# Altium footprint library MicroController$.PcbLib: 36 footprints (part 2 of 3)
Each footprint in its own frame and in the unit in brackets; x right, y up, seen from the top. Pads: shape width x height; smd on the part's side, far side on the other; paste and mask are expansions set on the pad; w line width, h text height; cw(c..) or ccw(c..) is an arc to the next point about the centre after c.
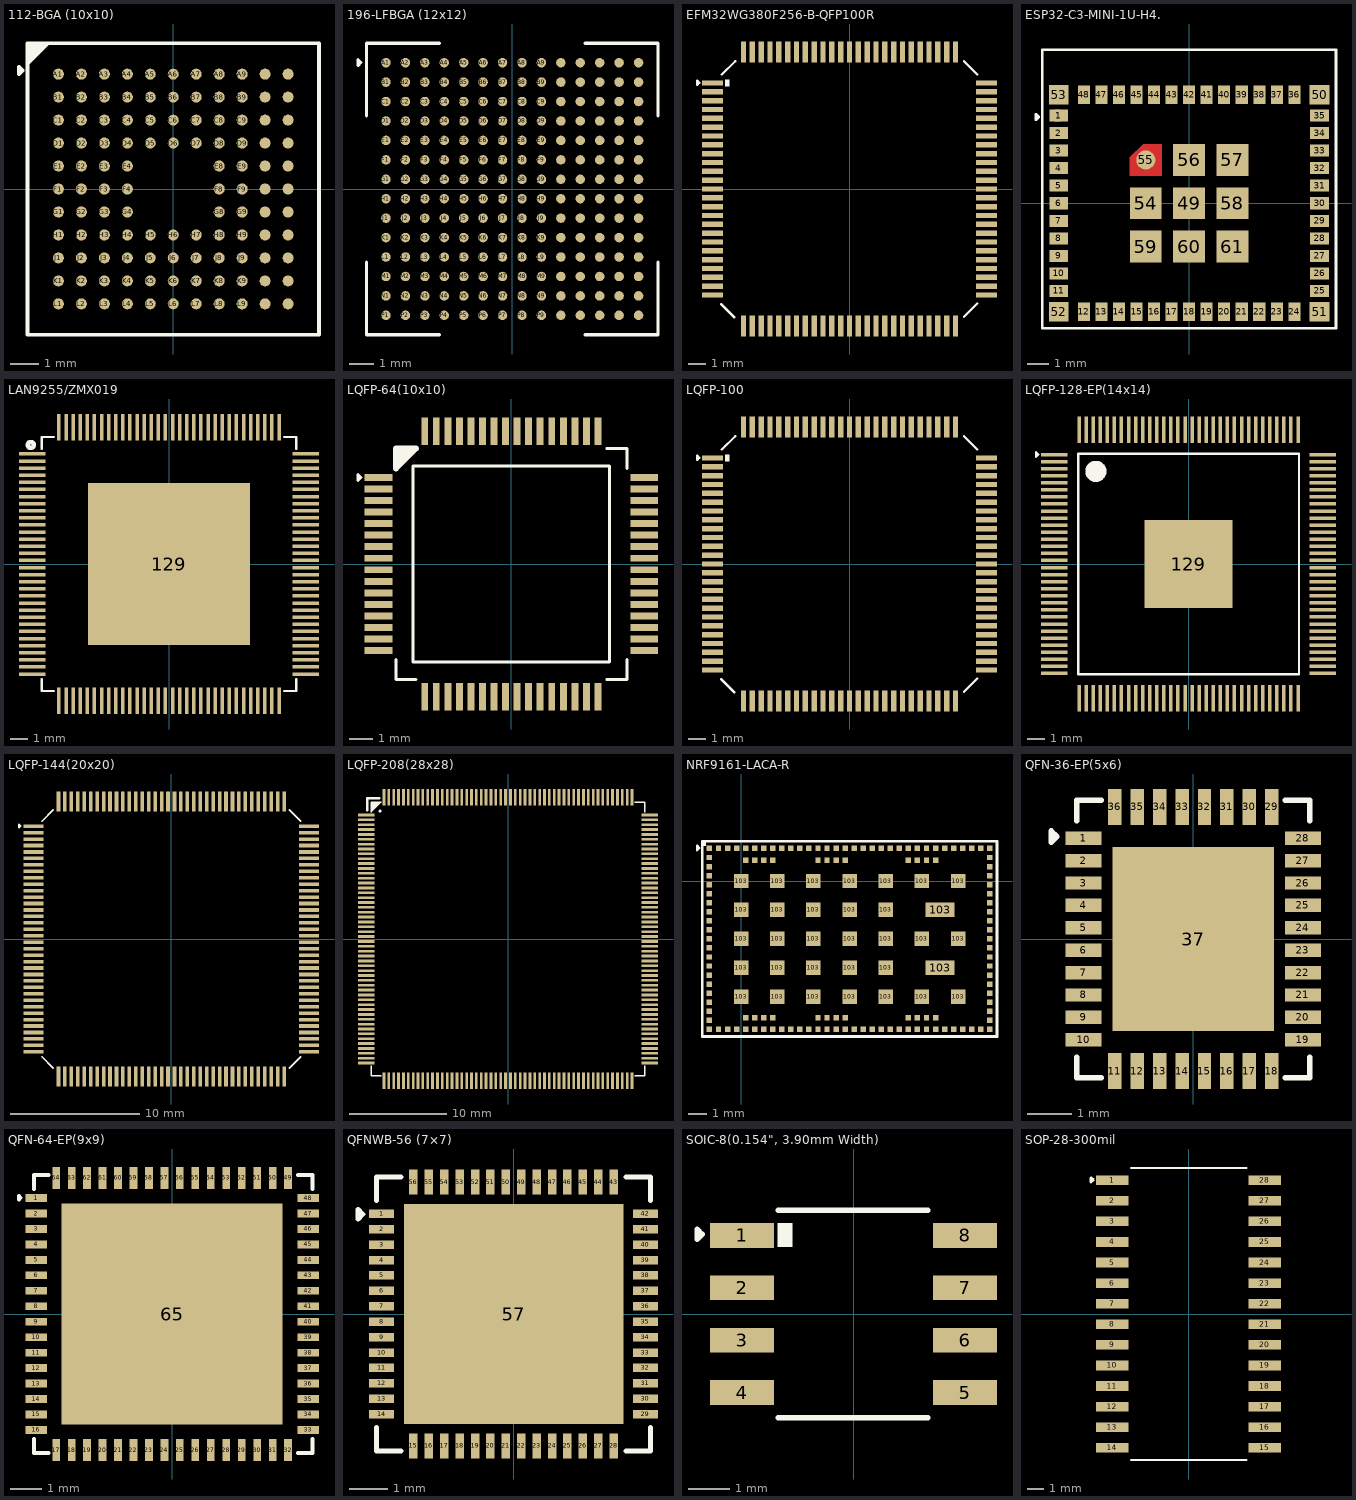
[diagram p1: the footprints below, top view; thin cyan lines are the x and y axes]

## 112-BGA (10x10) [mm]
pads (112):
  round 0.384 smd paste-100 mask+0.051: A1(-4,4) A2(-3.2,4) A3(-2.4,4) A4(-1.6,4) A5(-0.8,4) A6(0,4) A7(0.8,4) A8(1.6,4) A9(2.4,4) A10(3.2,4) A11(4,4) B1(-4,3.2) B2(-3.2,3.2) B3(-2.4,3.2) B4(-1.6,3.2) B5(-0.8,3.2) B6(0,3.2) B7(0.8,3.2) B8(1.6,3.2) B9(2.4,3.2) B10(3.2,3.2) B11(4,3.2) C1(-4,2.4) C2(-3.2,2.4) C3(-2.4,2.4) C4(-1.6,2.4) C5(-0.8,2.4) C6(0,2.4) C7(0.8,2.4) C8(1.6,2.4) C9(2.4,2.4) C10(3.2,2.4) C11(4,2.4) D1(-4,1.6) D2(-3.2,1.6) D3(-2.4,1.6) D4(-1.6,1.6) D5(-0.8,1.6) D6(0,1.6) D7(0.8,1.6) D8(1.6,1.6) D9(2.4,1.6) D10(3.2,1.6) D11(4,1.6) E1(-4,0.8) E2(-3.2,0.8) E3(-2.4,0.8) E4(-1.6,0.8) E8(1.6,0.8) E9(2.4,0.8) E10(3.2,0.8) E11(4,0.8) F1(-4,0) F2(-3.2,0) F3(-2.4,0) F4(-1.6,0) F8(1.6,0) F9(2.4,0) F10(3.2,0) F11(4,0) G1(-4,-0.8) G2(-3.2,-0.8) G3(-2.4,-0.8) G4(-1.6,-0.8) G8(1.6,-0.8) G9(2.4,-0.8) G10(3.2,-0.8) G11(4,-0.8) H1(-4,-1.6) H2(-3.2,-1.6) H3(-2.4,-1.6) H4(-1.6,-1.6) H5(-0.8,-1.6) H6(0,-1.6) H7(0.8,-1.6) H8(1.6,-1.6) H9(2.4,-1.6) H10(3.2,-1.6) H11(4,-1.6) J1(-4,-2.4) J2(-3.2,-2.4) J3(-2.4,-2.4) J4(-1.6,-2.4) J5(-0.8,-2.4) J6(0,-2.4) J7(0.8,-2.4) J8(1.6,-2.4) J9(2.4,-2.4) J10(3.2,-2.4) J11(4,-2.4) K1(-4,-3.2) K2(-3.2,-3.2) K3(-2.4,-3.2) K4(-1.6,-3.2) K5(-0.8,-3.2) K6(0,-3.2) K7(0.8,-3.2) K8(1.6,-3.2) K9(2.4,-3.2) K10(3.2,-3.2) K11(4,-3.2) L1(-4,-4) L2(-3.2,-4) L3(-2.4,-4) L4(-1.6,-4) L5(-0.8,-4) L6(0,-4) L7(0.8,-4) L8(1.6,-4) L9(2.4,-4) L10(3.2,-4) L11(4,-4)
Top Overlay:
  region: -5.076,5.076 -4.276,5.076 -5.076,4.276
  lines w0.127: -5.372,4 -5.372,4.254 -5.245,4.127 -5.372,4 ; -5.076,-5.076 5.076,-5.076 5.076,5.076 -5.076,5.076 -5.076,-5.076
Top Paste:
  circle w0.192: c4,-4 r0.096
  circle w0.192: c4,-3.2 r0.096
  circle w0.192: c4,-2.4 r0.096
  circle w0.192: c4,-1.6 r0.096
  circle w0.192: c4,-0.8 r0.096
  circle w0.192: c4,0 r0.096
  circle w0.192: c4,0.8 r0.096
  circle w0.192: c4,1.6 r0.096
  circle w0.192: c4,2.4 r0.096
  circle w0.192: c4,3.2 r0.096
  circle w0.192: c4,4 r0.096
  circle w0.192: c3.2,-4 r0.096
  circle w0.192: c3.2,-3.2 r0.096
  circle w0.192: c3.2,-2.4 r0.096
  circle w0.192: c3.2,-1.6 r0.096
  circle w0.192: c3.2,-0.8 r0.096
  circle w0.192: c3.2,0 r0.096
  circle w0.192: c3.2,0.8 r0.096
  circle w0.192: c3.2,1.6 r0.096
  circle w0.192: c3.2,2.4 r0.096
  circle w0.192: c3.2,3.2 r0.096
  circle w0.192: c3.2,4 r0.096
  circle w0.192: c2.4,-4 r0.096
  circle w0.192: c2.4,-3.2 r0.096
  circle w0.192: c2.4,-2.4 r0.096
  circle w0.192: c2.4,-1.6 r0.096
  circle w0.192: c2.4,-0.8 r0.096
  circle w0.192: c2.4,0 r0.096
  circle w0.192: c2.4,0.8 r0.096
  circle w0.192: c2.4,1.6 r0.096
  circle w0.192: c2.4,2.4 r0.096
  circle w0.192: c2.4,3.2 r0.096
  circle w0.192: c2.4,4 r0.096
  circle w0.192: c1.6,-4 r0.096
  circle w0.192: c1.6,-3.2 r0.096
  circle w0.192: c1.6,-2.4 r0.096
  circle w0.192: c1.6,-1.6 r0.096
  circle w0.192: c1.6,-0.8 r0.096
  circle w0.192: c1.6,0 r0.096
  circle w0.192: c1.6,0.8 r0.096
  circle w0.192: c1.6,1.6 r0.096
  circle w0.192: c1.6,2.4 r0.096
  circle w0.192: c1.6,3.2 r0.096
  circle w0.192: c1.6,4 r0.096
  circle w0.192: c0.8,-4 r0.096
  circle w0.192: c0.8,-3.2 r0.096
  circle w0.192: c0.8,-2.4 r0.096
  circle w0.192: c0.8,-1.6 r0.096
  circle w0.192: c0.8,1.6 r0.096
  circle w0.192: c0.8,2.4 r0.096
  circle w0.192: c0.8,3.2 r0.096
  circle w0.192: c0.8,4 r0.096
  circle w0.192: c0,-4 r0.096
  circle w0.192: c0,-3.2 r0.096
  circle w0.192: c0,-2.4 r0.096
  circle w0.192: c0,-1.6 r0.096
  circle w0.192: c0,1.6 r0.096
  circle w0.192: c0,2.4 r0.096
  circle w0.192: c0,3.2 r0.096
  circle w0.192: c0,4 r0.096
  circle w0.192: c-0.8,-4 r0.096
  circle w0.192: c-0.8,-3.2 r0.096
  circle w0.192: c-0.8,-2.4 r0.096
  circle w0.192: c-0.8,-1.6 r0.096
  circle w0.192: c-0.8,1.6 r0.096
  circle w0.192: c-0.8,2.4 r0.096
  circle w0.192: c-0.8,3.2 r0.096
  circle w0.192: c-0.8,4 r0.096
  circle w0.192: c-1.6,-4 r0.096
  circle w0.192: c-1.6,-3.2 r0.096
  circle w0.192: c-1.6,-2.4 r0.096
  circle w0.192: c-1.6,-1.6 r0.096
  circle w0.192: c-1.6,-0.8 r0.096
  circle w0.192: c-1.6,0 r0.096
  circle w0.192: c-1.6,0.8 r0.096
  circle w0.192: c-1.6,1.6 r0.096
  circle w0.192: c-1.6,2.4 r0.096
  circle w0.192: c-1.6,3.2 r0.096
  circle w0.192: c-1.6,4 r0.096
  circle w0.192: c-2.4,-4 r0.096
  circle w0.192: c-2.4,-3.2 r0.096
  circle w0.192: c-2.4,-2.4 r0.096
  circle w0.192: c-2.4,-1.6 r0.096
  circle w0.192: c-2.4,-0.8 r0.096
  circle w0.192: c-2.4,0 r0.096
  circle w0.192: c-2.4,0.8 r0.096
  circle w0.192: c-2.4,1.6 r0.096
  circle w0.192: c-2.4,2.4 r0.096
  circle w0.192: c-2.4,3.2 r0.096
  circle w0.192: c-2.4,4 r0.096
  circle w0.192: c-3.2,-4 r0.096
  circle w0.192: c-3.2,-3.2 r0.096
  circle w0.192: c-3.2,-2.4 r0.096
  circle w0.192: c-3.2,-1.6 r0.096
  circle w0.192: c-3.2,-0.8 r0.096
  circle w0.192: c-3.2,0 r0.096
  circle w0.192: c-3.2,0.8 r0.096
  circle w0.192: c-3.2,1.6 r0.096
  circle w0.192: c-3.2,2.4 r0.096
  circle w0.192: c-3.2,3.2 r0.096
  circle w0.192: c-3.2,4 r0.096
  circle w0.192: c-4,-4 r0.096
  circle w0.192: c-4,-3.2 r0.096
  circle w0.192: c-4,-2.4 r0.096
  circle w0.192: c-4,-1.6 r0.096
  circle w0.192: c-4,-0.8 r0.096
  circle w0.192: c-4,0 r0.096
  circle w0.192: c-4,0.8 r0.096
  circle w0.192: c-4,1.6 r0.096
  circle w0.192: c-4,2.4 r0.096
  circle w0.192: c-4,3.2 r0.096
  circle w0.192: c-4,4 r0.096
3D body "C3210780.step": height 1.17, standoff 0, extent -5,-5 5,5

## 196-LFBGA (12x12) [mm]
pads (196):
  round 0.39 smd: A1(-5.2,5.2) A2(-4.4,5.2) A3(-3.6,5.2) A4(-2.8,5.2) A5(-2,5.2) A6(-1.2,5.2) A7(-0.4,5.2) A8(0.4,5.2) A9(1.2,5.2) A10(2,5.2) A11(2.8,5.2) A12(3.6,5.2) A13(4.4,5.2) A14(5.2,5.2) B1(-5.2,4.4) B2(-4.4,4.4) B3(-3.6,4.4) B4(-2.8,4.4) B5(-2,4.4) B6(-1.2,4.4) B7(-0.4,4.4) B8(0.4,4.4) B9(1.2,4.4) B10(2,4.4) B11(2.8,4.4) B12(3.6,4.4) B13(4.4,4.4) B14(5.2,4.4) C1(-5.2,3.6) C2(-4.4,3.6) C3(-3.6,3.6) C4(-2.8,3.6) C5(-2,3.6) C6(-1.2,3.6) C7(-0.4,3.6) C8(0.4,3.6) C9(1.2,3.6) C10(2,3.6) C11(2.8,3.6) C12(3.6,3.6) C13(4.4,3.6) C14(5.2,3.6) D1(-5.2,2.8) D2(-4.4,2.8) D3(-3.6,2.8) D4(-2.8,2.8) D5(-2,2.8) D6(-1.2,2.8) D7(-0.4,2.8) D8(0.4,2.8) D9(1.2,2.8) D10(2,2.8) D11(2.8,2.8) D12(3.6,2.8) D13(4.4,2.8) D14(5.2,2.8) E1(-5.2,2) E2(-4.4,2) E3(-3.6,2) E4(-2.8,2) E5(-2,2) E6(-1.2,2) E7(-0.4,2) E8(0.4,2) E9(1.2,2) E10(2,2) E11(2.8,2) E12(3.6,2) E13(4.4,2) E14(5.2,2) F1(-5.2,1.2) F2(-4.4,1.2) F3(-3.6,1.2) F4(-2.8,1.2) F5(-2,1.2) F6(-1.2,1.2) F7(-0.4,1.2) F8(0.4,1.2) F9(1.2,1.2) F10(2,1.2) F11(2.8,1.2) F12(3.6,1.2) F13(4.4,1.2) F14(5.2,1.2) G1(-5.2,0.4) G2(-4.4,0.4) G3(-3.6,0.4) G4(-2.8,0.4) G5(-2,0.4) G6(-1.2,0.4) G7(-0.4,0.4) G8(0.4,0.4) G9(1.2,0.4) G10(2,0.4) G11(2.8,0.4) G12(3.6,0.4) G13(4.4,0.4) G14(5.2,0.4) H1(-5.2,-0.4) H2(-4.4,-0.4) H3(-3.6,-0.4) H4(-2.8,-0.4) H5(-2,-0.4) H6(-1.2,-0.4) H7(-0.4,-0.4) H8(0.4,-0.4) H9(1.2,-0.4) H10(2,-0.4) H11(2.8,-0.4) H12(3.6,-0.4) H13(4.4,-0.4) H14(5.2,-0.4) J1(-5.2,-1.2) J2(-4.4,-1.2) J3(-3.6,-1.2) J4(-2.8,-1.2) J5(-2,-1.2) J6(-1.2,-1.2) J7(-0.4,-1.2) J8(0.4,-1.2) J9(1.2,-1.2) J10(2,-1.2) J11(2.8,-1.2) J12(3.6,-1.2) J13(4.4,-1.2) J14(5.2,-1.2) K1(-5.2,-2) K2(-4.4,-2) K3(-3.6,-2) K4(-2.8,-2) K5(-2,-2) K6(-1.2,-2) K7(-0.4,-2) K8(0.4,-2) K9(1.2,-2) K10(2,-2) K11(2.8,-2) K12(3.6,-2) K13(4.4,-2) K14(5.2,-2) L1(-5.2,-2.8) L2(-4.4,-2.8) L3(-3.6,-2.8) L4(-2.8,-2.8) L5(-2,-2.8) L6(-1.2,-2.8) L7(-0.4,-2.8) L8(0.4,-2.8) L9(1.2,-2.8) L10(2,-2.8) L11(2.8,-2.8) L12(3.6,-2.8) L13(4.4,-2.8) L14(5.2,-2.8) M1(-5.2,-3.6) M2(-4.4,-3.6) M3(-3.6,-3.6) M4(-2.8,-3.6) M5(-2,-3.6) M6(-1.2,-3.6) M7(-0.4,-3.6) M8(0.4,-3.6) M9(1.2,-3.6) M10(2,-3.6) M11(2.8,-3.6) M12(3.6,-3.6) M13(4.4,-3.6) M14(5.2,-3.6) N1(-5.2,-4.4) N2(-4.4,-4.4) N3(-3.6,-4.4) N4(-2.8,-4.4) N5(-2,-4.4) N6(-1.2,-4.4) N7(-0.4,-4.4) N8(0.4,-4.4) N9(1.2,-4.4) N10(2,-4.4) N11(2.8,-4.4) N12(3.6,-4.4) N13(4.4,-4.4) N14(5.2,-4.4) P1(-5.2,-5.2) P2(-4.4,-5.2) P3(-3.6,-5.2) P4(-2.8,-5.2) P5(-2,-5.2) P6(-1.2,-5.2) P7(-0.4,-5.2) P8(0.4,-5.2) P9(1.2,-5.2) P10(2,-5.2) P11(2.8,-5.2) P12(3.6,-5.2) P13(4.4,-5.2) P14(5.2,-5.2)
Top Overlay:
  lines w0.127: -6,-3 -6,-6 -3,-6 ; -6,3 -6,6 -3,6 ; 3,-6 6,-6 6,-3 ; 3,6 6,6 6,3 ; -6.35,5.08 -6.35,5.334 -6.223,5.207 -6.35,5.08
3D body "MIMXRT1052CVJ5B--3DModel-STEP-56544.STEP": height 1.58, standoff -0.03, extent -6,-6 6,6

## EFM32WG380F256-B-QFP100R [mm]
pads (100):
  rect 1.2x0.3 smd: 1(-7.75,6) 2(-7.75,5.5) 3(-7.75,5) 4(-7.75,4.5) 5(-7.75,4) 6(-7.75,3.5) 7(-7.75,3) 8(-7.75,2.5) 9(-7.75,2) 10(-7.75,1.5) 11(-7.75,1) 12(-7.75,0.5) 13(-7.75,0) 14(-7.75,-0.5) 15(-7.75,-1) 16(-7.75,-1.5) 17(-7.75,-2) 18(-7.75,-2.5) 19(-7.75,-3) 20(-7.75,-3.5) 21(-7.75,-4) 22(-7.75,-4.5) 23(-7.75,-5) 24(-7.75,-5.5) 25(-7.75,-6) 51(7.75,-6) 52(7.75,-5.5) 53(7.75,-5) 54(7.75,-4.5) 55(7.75,-4) 56(7.75,-3.5) 57(7.75,-3) 58(7.75,-2.5) 59(7.75,-2) 60(7.75,-1.5) 61(7.75,-1) 62(7.75,-0.5) 63(7.75,0) 64(7.75,0.5) 65(7.75,1) 66(7.75,1.5) 67(7.75,2) 68(7.75,2.5) 69(7.75,3) 70(7.75,3.5) 71(7.75,4) 72(7.75,4.5) 73(7.75,5) 74(7.75,5.5) 75(7.75,6)
  rect 0.3x1.2 smd: 26(-6,-7.75) 27(-5.5,-7.75) 28(-5,-7.75) 29(-4.5,-7.75) 30(-4,-7.75) 31(-3.5,-7.75) 32(-3,-7.75) 33(-2.5,-7.75) 34(-2,-7.75) 35(-1.5,-7.75) 36(-1,-7.75) 37(-0.5,-7.75) 38(0,-7.75) 39(0.5,-7.75) 40(1,-7.75) 41(1.5,-7.75) 42(2,-7.75) 43(2.5,-7.75) 44(3,-7.75) 45(3.5,-7.75) 46(4,-7.75) 47(4.5,-7.75) 48(5,-7.75) 49(5.5,-7.75) 50(6,-7.75) 76(6,7.75) 77(5.5,7.75) 78(5,7.75) 79(4.5,7.75) 80(4,7.75) 81(3.5,7.75) 82(3,7.75) 83(2.5,7.75) 84(2,7.75) 85(1.5,7.75) 86(1,7.75) 87(0.5,7.75) 88(0,7.75) 89(-0.5,7.75) 90(-1,7.75) 91(-1.5,7.75) 92(-2,7.75) 93(-2.5,7.75) 94(-3,7.75) 95(-3.5,7.75) 96(-4,7.75) 97(-4.5,7.75) 98(-5,7.75) 99(-5.5,7.75) 100(-6,7.75)
Top Overlay:
  rectangle: -7.061,5.791 -6.782,6.198
  lines w0.127: -7.273,-6.511 -6.511,-7.273 ; -7.239,6.477 -6.477,7.239 ; 6.477,-7.239 7.239,-6.477 ; 6.477,7.239 7.239,6.477 ; -8.636,5.893 -8.636,6.147 -8.509,6.02 -8.636,5.893
3D body "User Library-LQFP100_05.step": height 1.6, standoff 0, extent -8,-8 8,8

## ESP32-C3-MINI-1U-H4. [mm]
pads (61):
  rect 0.85x0.55 smd paste+0 mask+0.05: 1(-5.95,4) 2(-5.95,3.2) 3(-5.95,2.4) 4(-5.95,1.6) 5(-5.95,0.8) 6(-5.95,0) 7(-5.95,-0.8) 8(-5.95,-1.6) 9(-5.95,-2.4) 10(-5.95,-3.2) 11(-5.95,-4) 25(5.95,-4) 26(5.95,-3.2) 27(5.95,-2.4) 28(5.95,-1.6) 29(5.95,-0.8) 30(5.95,0) 31(5.95,0.8) 32(5.95,1.6) 33(5.95,2.4) 34(5.95,3.2) 35(5.95,4)
  rect 0.55x0.85 smd paste+0 mask+0.05: 12(-4.8,-4.95) 13(-4,-4.95) 14(-3.2,-4.95) 15(-2.4,-4.95) 16(-1.6,-4.95) 17(-0.8,-4.95) 18(0,-4.95) 19(0.8,-4.95) 20(1.6,-4.95) 21(2.4,-4.95) 22(3.2,-4.95) 23(4,-4.95) 24(4.8,-4.95) 36(4.8,4.95) 37(4,4.95) 38(3.2,4.95) 39(2.4,4.95) 40(1.6,4.95) 41(0.8,4.95) 42(0,4.95) 43(-0.8,4.95) 44(-1.6,4.95) 45(-2.4,4.95) 46(-3.2,4.95) 47(-4,4.95) 48(-4.8,4.95)
  rect 1.45x1.45 smd paste+0 mask+0.05: 49(0,0) 54(-1.975,0) 56(0,1.975) 57(1.975,1.975) 58(1.975,0) 59(-1.975,-1.975) 60(0,-1.975) 61(1.975,-1.975)
  rect 0.9x0.9 smd paste+0 mask+0.05: 50(5.95,4.95) 51(5.95,-4.95) 52(-5.95,-4.95) 53(-5.95,4.95)
  round 0.87 smd: 55(-1.975,1.975)
Top Layer:
  region: -2.7,2.1 -2.1,2.7 -1.25,2.7 -1.25,1.25 -2.7,1.25
Top Overlay:
  lines w0.127: -6.7,3.45 -6.7,7 6.7,7 6.7,-5.7 -6.7,-5.7 -6.7,3.5 ; -6.985,3.81 -6.985,4.064 -6.858,3.937 -6.985,3.81
Mechanical 6:
  circle w0.3: c-6,4 r0.15
3D body "ESP32-C3-MINI-1U 3D Model.STEP": height 2.4, standoff 0, extent -6.6,-5.588 6.6,6.912

## LAN9255/ZMX019 [mm]
pads (129):
  rect 1.5x0.2 smd: 1(-7.7,6.2) 2(-7.7,5.8) 3(-7.7,5.4) 4(-7.7,5) 5(-7.7,4.6) 6(-7.7,4.2) 7(-7.7,3.8) 8(-7.7,3.4) 9(-7.7,3) 10(-7.7,2.6) 11(-7.7,2.2) 12(-7.7,1.8) 13(-7.7,1.4) 14(-7.7,1) 15(-7.7,0.6) 16(-7.7,0.2) 17(-7.7,-0.2) 18(-7.7,-0.6) 19(-7.7,-1) 20(-7.7,-1.4) 21(-7.7,-1.8) 22(-7.7,-2.2) 23(-7.7,-2.6) 24(-7.7,-3) 25(-7.7,-3.4) 26(-7.7,-3.8) 27(-7.7,-4.2) 28(-7.7,-4.6) 29(-7.7,-5) 30(-7.7,-5.4) 31(-7.7,-5.8) 32(-7.7,-6.2) 65(7.7,-6.2) 66(7.7,-5.8) 67(7.7,-5.4) 68(7.7,-5) 69(7.7,-4.6) 70(7.7,-4.2) 71(7.7,-3.8) 72(7.7,-3.4) 73(7.7,-3) 74(7.7,-2.6) 75(7.7,-2.2) 76(7.7,-1.8) 77(7.7,-1.4) 78(7.7,-1) 79(7.7,-0.6) 80(7.7,-0.2) 81(7.7,0.2) 82(7.7,0.6) 83(7.7,1) 84(7.7,1.4) 85(7.7,1.8) 86(7.7,2.2) 87(7.7,2.6) 88(7.7,3) 89(7.7,3.4) 90(7.7,3.8) 91(7.7,4.2) 92(7.7,4.6) 93(7.7,5) 94(7.7,5.4) 95(7.7,5.8) 96(7.7,6.2)
  rect 0.2x1.5 smd: 33(-6.2,-7.7) 34(-5.8,-7.7) 35(-5.4,-7.7) 36(-5,-7.7) 37(-4.6,-7.7) 38(-4.2,-7.7) 39(-3.8,-7.7) 40(-3.4,-7.7) 41(-3,-7.7) 42(-2.6,-7.7) 43(-2.2,-7.7) 44(-1.8,-7.7) 45(-1.4,-7.7) 46(-1,-7.7) 47(-0.6,-7.7) 48(-0.2,-7.7) 49(0.2,-7.7) 50(0.6,-7.7) 51(1,-7.7) 52(1.4,-7.7) 53(1.8,-7.7) 54(2.2,-7.7) 55(2.6,-7.7) 56(3,-7.7) 57(3.4,-7.7) 58(3.8,-7.7) 59(4.2,-7.7) 60(4.6,-7.7) 61(5,-7.7) 62(5.4,-7.7) 63(5.8,-7.7) 64(6.2,-7.7) 97(6.2,7.7) 98(5.8,7.7) 99(5.4,7.7) 100(5,7.7) 101(4.6,7.7) 102(4.2,7.7) 103(3.8,7.7) 104(3.4,7.7) 105(3,7.7) 106(2.6,7.7) 107(2.2,7.7) 108(1.8,7.7) 109(1.4,7.7) 110(1,7.7) 111(0.6,7.7) 112(0.2,7.7) 113(-0.2,7.7) 114(-0.6,7.7) 115(-1,7.7) 116(-1.4,7.7) 117(-1.8,7.7) 118(-2.2,7.7) 119(-2.6,7.7) 120(-3,7.7) 121(-3.4,7.7) 122(-3.8,7.7) 123(-4.2,7.7) 124(-4.6,7.7) 125(-5,7.7) 126(-5.4,7.7) 127(-5.8,7.7) 128(-6.2,7.7)
  rect 9.1x9.1 smd: 129(0,0)
Top Overlay:
  circle w0.254: c-7.785,6.706 r0.165
  lines w0.127: -7.163,-6.49 -7.163,-7.15 -6.477,-7.15 ; -7.163,6.49 -7.163,7.15 -6.477,7.15 ; 6.477,-7.15 7.163,-7.15 7.163,-6.49 ; 6.477,7.15 7.163,7.15 7.163,6.49
3D body "User Library-TQFP128.step": height 1.1, standoff 0, extent -8.009,-8.009 8.009,8.009

## LQFP-64(10x10) [mm]
pads (64):
  rect 1.2x0.3 smd paste+0 mask+0.051: 1(-5.75,3.75) 2(-5.75,3.25) 3(-5.75,2.75) 4(-5.75,2.25) 5(-5.75,1.75) 6(-5.75,1.25) 7(-5.75,0.75) 8(-5.75,0.25) 9(-5.75,-0.25) 10(-5.75,-0.75) 11(-5.75,-1.25) 12(-5.75,-1.75) 13(-5.75,-2.25) 14(-5.75,-2.75) 15(-5.75,-3.25) 16(-5.75,-3.75) 33(5.75,-3.75) 34(5.75,-3.25) 35(5.75,-2.75) 36(5.75,-2.25) 37(5.75,-1.75) 38(5.75,-1.25) 39(5.75,-0.75) 40(5.75,-0.25) 41(5.75,0.25) 42(5.75,0.75) 43(5.75,1.25) 44(5.75,1.75) 45(5.75,2.25) 46(5.75,2.75) 47(5.75,3.25) 48(5.75,3.75)
  rect 0.3x1.2 smd paste+0 mask+0.051: 17(-3.75,-5.75) 18(-3.25,-5.75) 19(-2.75,-5.75) 20(-2.25,-5.75) 21(-1.75,-5.75) 22(-1.25,-5.75) 23(-0.75,-5.75) 24(-0.25,-5.75) 25(0.25,-5.75) 26(0.75,-5.75) 27(1.25,-5.75) 28(1.75,-5.75) 29(2.25,-5.75) 30(2.75,-5.75) 31(3.25,-5.75) 32(3.75,-5.75) 49(3.75,5.75) 50(3.25,5.75) 51(2.75,5.75) 52(2.25,5.75) 53(1.75,5.75) 54(1.25,5.75) 55(0.75,5.75) 56(0.25,5.75) 57(-0.25,5.75) 58(-0.75,5.75) 59(-1.25,5.75) 60(-1.75,5.75) 61(-2.25,5.75) 62(-2.75,5.75) 63(-3.25,5.75) 64(-3.75,5.75)
Top Overlay:
  region: -5,4.131 -4.131,5 -5,5
  lines w0.127: -5,-4.131 -5,-5 -4.131,-5 ; 4.131,-5 5,-5 5,-4.131 ; 4.131,5 5,5 5,4.131 ; -6.639,3.623 -6.512,3.75 -6.639,3.877 -6.639,3.623 ; -4.25,-4.25 4.25,-4.25 4.25,4.25 -4.25,4.25 -4.25,-4.25
  lines w0.254: -4.131,5 -5,5 -5,4.131 -4.131,5 ; -4.131,5 -4.131,5
3D body "STM32G0B1RET6.step": height 1.6, standoff 0, extent -6,-6 6,6

## LQFP-100 [mm]
pads (100):
  rect 1.2x0.3 smd: 1(-7.75,6) 2(-7.75,5.5) 3(-7.75,5) 4(-7.75,4.5) 5(-7.75,4) 6(-7.75,3.5) 7(-7.75,3) 8(-7.75,2.5) 9(-7.75,2) 10(-7.75,1.5) 11(-7.75,1) 12(-7.75,0.5) 13(-7.75,0) 14(-7.75,-0.5) 15(-7.75,-1) 16(-7.75,-1.5) 17(-7.75,-2) 18(-7.75,-2.5) 19(-7.75,-3) 20(-7.75,-3.5) 21(-7.75,-4) 22(-7.75,-4.5) 23(-7.75,-5) 24(-7.75,-5.5) 25(-7.75,-6) 51(7.75,-6) 52(7.75,-5.5) 53(7.75,-5) 54(7.75,-4.5) 55(7.75,-4) 56(7.75,-3.5) 57(7.75,-3) 58(7.75,-2.5) 59(7.75,-2) 60(7.75,-1.5) 61(7.75,-1) 62(7.75,-0.5) 63(7.75,0) 64(7.75,0.5) 65(7.75,1) 66(7.75,1.5) 67(7.75,2) 68(7.75,2.5) 69(7.75,3) 70(7.75,3.5) 71(7.75,4) 72(7.75,4.5) 73(7.75,5) 74(7.75,5.5) 75(7.75,6)
  rect 0.3x1.2 smd: 26(-6,-7.75) 27(-5.5,-7.75) 28(-5,-7.75) 29(-4.5,-7.75) 30(-4,-7.75) 31(-3.5,-7.75) 32(-3,-7.75) 33(-2.5,-7.75) 34(-2,-7.75) 35(-1.5,-7.75) 36(-1,-7.75) 37(-0.5,-7.75) 38(0,-7.75) 39(0.5,-7.75) 40(1,-7.75) 41(1.5,-7.75) 42(2,-7.75) 43(2.5,-7.75) 44(3,-7.75) 45(3.5,-7.75) 46(4,-7.75) 47(4.5,-7.75) 48(5,-7.75) 49(5.5,-7.75) 50(6,-7.75) 76(6,7.75) 77(5.5,7.75) 78(5,7.75) 79(4.5,7.75) 80(4,7.75) 81(3.5,7.75) 82(3,7.75) 83(2.5,7.75) 84(2,7.75) 85(1.5,7.75) 86(1,7.75) 87(0.5,7.75) 88(0,7.75) 89(-0.5,7.75) 90(-1,7.75) 91(-1.5,7.75) 92(-2,7.75) 93(-2.5,7.75) 94(-3,7.75) 95(-3.5,7.75) 96(-4,7.75) 97(-4.5,7.75) 98(-5,7.75) 99(-5.5,7.75) 100(-6,7.75)
Top Overlay:
  rectangle: -7.061,5.791 -6.782,6.198
  lines w0.127: -7.273,-6.511 -6.511,-7.273 ; -7.239,6.477 -6.477,7.239 ; 6.477,-7.239 7.239,-6.477 ; 6.477,7.239 7.239,6.477 ; -8.636,5.893 -8.509,6.02 -8.636,6.147 -8.636,5.893
3D body "User Library-LQFP100_05.step": height 1.6, standoff 0, extent -8,-8 8,8

## LQFP-128-EP(14x14) [mm]
pads (129):
  rect 1.5x0.2 smd mask+0.07: 1(-7.6,6.2) 2(-7.6,5.8) 3(-7.6,5.4) 4(-7.6,5) 5(-7.6,4.6) 6(-7.6,4.2) 7(-7.6,3.8) 8(-7.6,3.4) 9(-7.6,3) 10(-7.6,2.6) 11(-7.6,2.2) 12(-7.6,1.8) 13(-7.6,1.4) 14(-7.6,1) 15(-7.6,0.6) 16(-7.6,0.2) 17(-7.6,-0.2) 18(-7.6,-0.6) 19(-7.6,-1) 20(-7.6,-1.4) 21(-7.6,-1.8) 22(-7.6,-2.2) 23(-7.6,-2.6) 24(-7.6,-3) 25(-7.6,-3.4) 26(-7.6,-3.8) 27(-7.6,-4.2) 28(-7.6,-4.6) 29(-7.6,-5) 30(-7.6,-5.4) 31(-7.6,-5.8) 32(-7.6,-6.2) 65(7.6,-6.2) 66(7.6,-5.8) 67(7.6,-5.4) 68(7.6,-5) 69(7.6,-4.6) 70(7.6,-4.2) 71(7.6,-3.8) 72(7.6,-3.4) 73(7.6,-3) 74(7.6,-2.6) 75(7.6,-2.2) 76(7.6,-1.8) 77(7.6,-1.4) 78(7.6,-1) 79(7.6,-0.6) 80(7.6,-0.2) 81(7.6,0.2) 82(7.6,0.6) 83(7.6,1) 84(7.6,1.4) 85(7.6,1.8) 86(7.6,2.2) 87(7.6,2.6) 88(7.6,3) 89(7.6,3.4) 90(7.6,3.8) 91(7.6,4.2) 92(7.6,4.6) 93(7.6,5) 94(7.6,5.4) 95(7.6,5.8) 96(7.6,6.2)
  rect 0.2x1.5 smd mask+0.07: 33(-6.2,-7.6) 34(-5.8,-7.6) 35(-5.4,-7.6) 36(-5,-7.6) 37(-4.6,-7.6) 38(-4.2,-7.6) 39(-3.8,-7.6) 40(-3.4,-7.6) 41(-3,-7.6) 42(-2.6,-7.6) 43(-2.2,-7.6) 44(-1.8,-7.6) 45(-1.4,-7.6) 46(-1,-7.6) 47(-0.6,-7.6) 48(-0.2,-7.6) 49(0.2,-7.6) 50(0.6,-7.6) 51(1,-7.6) 52(1.4,-7.6) 53(1.8,-7.6) 54(2.2,-7.6) 55(2.6,-7.6) 56(3,-7.6) 57(3.4,-7.6) 58(3.8,-7.6) 59(4.2,-7.6) 60(4.6,-7.6) 61(5,-7.6) 62(5.4,-7.6) 63(5.8,-7.6) 64(6.2,-7.6) 97(6.2,7.6) 98(5.8,7.6) 99(5.4,7.6) 100(5,7.6) 101(4.6,7.6) 102(4.2,7.6) 103(3.8,7.6) 104(3.4,7.6) 105(3,7.6) 106(2.6,7.6) 107(2.2,7.6) 108(1.8,7.6) 109(1.4,7.6) 110(1,7.6) 111(0.6,7.6) 112(0.2,7.6) 113(-0.2,7.6) 114(-0.6,7.6) 115(-1,7.6) 116(-1.4,7.6) 117(-1.8,7.6) 118(-2.2,7.6) 119(-2.6,7.6) 120(-3,7.6) 121(-3.4,7.6) 122(-3.8,7.6) 123(-4.2,7.6) 124(-4.6,7.6) 125(-5,7.6) 126(-5.4,7.6) 127(-5.8,7.6) 128(-6.2,7.6)
  rect 5x5 smd mask+0.07: 129(0,0)
Top Overlay:
  lines w0.127: -8.641,6.073 -8.514,6.2 -8.641,6.327 -8.641,6.073 ; -6.25,-6.25 6.25,-6.25 6.25,6.25 -6.25,6.25 -6.25,-6.25
  lines w0.6: -4.95,5.245 cw(c-5.25,5.248) -5.55,5.248 cw(c-5.25,5.248) -4.95,5.25
3D body "C2687449.step": height 1.61, standoff 0, extent -8,-8 8,8

## LQFP-144(20x20) [mm]
pads (144):
  rect 1.56x0.28 smd: 1(-10.68,8.75) 2(-10.68,8.25) 3(-10.68,7.75) 4(-10.68,7.25) 5(-10.68,6.75) 6(-10.68,6.25) 7(-10.68,5.75) 8(-10.68,5.25) 9(-10.68,4.75) 10(-10.68,4.25) 11(-10.68,3.75) 12(-10.68,3.25) 13(-10.68,2.75) 14(-10.68,2.25) 15(-10.68,1.75) 16(-10.68,1.25) 17(-10.68,0.75) 18(-10.68,0.25) 19(-10.68,-0.25) 20(-10.68,-0.75) 21(-10.68,-1.25) 22(-10.68,-1.75) 23(-10.68,-2.25) 24(-10.68,-2.75) 25(-10.68,-3.25) 26(-10.68,-3.75) 27(-10.68,-4.25) 28(-10.68,-4.75) 29(-10.68,-5.25) 30(-10.68,-5.75) 31(-10.68,-6.25) 32(-10.68,-6.75) 33(-10.68,-7.25) 34(-10.68,-7.75) 35(-10.68,-8.25) 36(-10.68,-8.75) 73(10.68,-8.75) 74(10.68,-8.25) 75(10.68,-7.75) 76(10.68,-7.25) 77(10.68,-6.75) 78(10.68,-6.25) 79(10.68,-5.75) 80(10.68,-5.25) 81(10.68,-4.75) 82(10.68,-4.25) 83(10.68,-3.75) 84(10.68,-3.25) 85(10.68,-2.75) 86(10.68,-2.25) 87(10.68,-1.75) 88(10.68,-1.25) 89(10.68,-0.75) 90(10.68,-0.25) 91(10.68,0.25) 92(10.68,0.75) 93(10.68,1.25) 94(10.68,1.75) 95(10.68,2.25) 96(10.68,2.75) 97(10.68,3.25) 98(10.68,3.75) 99(10.68,4.25) 100(10.68,4.75) 101(10.68,5.25) 102(10.68,5.75) 103(10.68,6.25) 104(10.68,6.75) 105(10.68,7.25) 106(10.68,7.75) 107(10.68,8.25) 108(10.68,8.75)
  rect 0.28x1.56 smd: 37(-8.75,-10.68) 38(-8.25,-10.68) 39(-7.75,-10.68) 40(-7.25,-10.68) 41(-6.75,-10.68) 42(-6.25,-10.68) 43(-5.75,-10.68) 44(-5.25,-10.68) 45(-4.75,-10.68) 46(-4.25,-10.68) 47(-3.75,-10.68) 48(-3.25,-10.68) 49(-2.75,-10.68) 50(-2.25,-10.68) 51(-1.75,-10.68) 52(-1.25,-10.68) 53(-0.75,-10.68) 54(-0.25,-10.68) 55(0.25,-10.68) 56(0.75,-10.68) 57(1.25,-10.68) 58(1.75,-10.68) 59(2.25,-10.68) 60(2.75,-10.68) 61(3.25,-10.68) 62(3.75,-10.68) 63(4.25,-10.68) 64(4.75,-10.68) 65(5.25,-10.68) 66(5.75,-10.68) 67(6.25,-10.68) 68(6.75,-10.68) 69(7.25,-10.68) 70(7.75,-10.68) 71(8.25,-10.68) 72(8.75,-10.68) 109(8.75,10.68) 110(8.25,10.68) 111(7.75,10.68) 112(7.25,10.68) 113(6.75,10.68) 114(6.25,10.68) 115(5.75,10.68) 116(5.25,10.68) 117(4.75,10.68) 118(4.25,10.68) 119(3.75,10.68) 120(3.25,10.68) 121(2.75,10.68) 122(2.25,10.68) 123(1.75,10.68) 124(1.25,10.68) 125(0.75,10.68) 126(0.25,10.68) 127(-0.25,10.68) 128(-0.75,10.68) 129(-1.25,10.68) 130(-1.75,10.68) 131(-2.25,10.68) 132(-2.75,10.68) 133(-3.25,10.68) 134(-3.75,10.68) 135(-4.25,10.68) 136(-4.75,10.68) 137(-5.25,10.68) 138(-5.75,10.68) 139(-6.25,10.68) 140(-6.75,10.68) 141(-7.25,10.68) 142(-7.75,10.68) 143(-8.25,10.68) 144(-8.75,10.68)
Top Overlay:
  lines w0.127: -10.033,-9.144 -9.144,-10.033 ; -10.033,9.144 -9.144,10.033 ; 9.144,-10.033 10.033,-9.144 ; 9.144,10.033 10.033,9.144 ; -11.811,8.636 -11.684,8.763 -11.811,8.89 -11.811,8.636
3D body "STM32F103ZGT6.STEP": height 1.61, standoff 0.01, extent -11,-11 11,11

## LQFP-208(28x28) [mm]
pads (208):
  rect 1.67x0.28 smd: 1(-14.58,12.75) 2(-14.58,12.25) 3(-14.58,11.75) 4(-14.58,11.25) 5(-14.58,10.75) 6(-14.58,10.25) 7(-14.58,9.75) 8(-14.58,9.25) 9(-14.58,8.75) 10(-14.58,8.25) 11(-14.58,7.75) 12(-14.58,7.25) 13(-14.58,6.75) 14(-14.58,6.25) 15(-14.58,5.75) 16(-14.58,5.25) 17(-14.58,4.75) 18(-14.58,4.25) 19(-14.58,3.75) 20(-14.58,3.25) 21(-14.58,2.75) 22(-14.58,2.25) 23(-14.58,1.75) 24(-14.58,1.25) 25(-14.58,0.75) 26(-14.58,0.25) 27(-14.58,-0.25) 28(-14.58,-0.75) 29(-14.58,-1.25) 30(-14.58,-1.75) 31(-14.58,-2.25) 32(-14.58,-2.75) 33(-14.58,-3.25) 34(-14.58,-3.75) 35(-14.58,-4.25) 36(-14.58,-4.75) 37(-14.58,-5.25) 38(-14.58,-5.75) 39(-14.58,-6.25) 40(-14.58,-6.75) 41(-14.58,-7.25) 42(-14.58,-7.75) 43(-14.58,-8.25) 44(-14.58,-8.75) 45(-14.58,-9.25) 46(-14.58,-9.75) 47(-14.58,-10.25) 48(-14.58,-10.75) 49(-14.58,-11.25) 50(-14.58,-11.75) 51(-14.58,-12.25) 52(-14.58,-12.75) 105(14.58,-12.75) 106(14.58,-12.25) 107(14.58,-11.75) 108(14.58,-11.25) 109(14.58,-10.75) 110(14.58,-10.25) 111(14.58,-9.75) 112(14.58,-9.25) 113(14.58,-8.75) 114(14.58,-8.25) 115(14.58,-7.75) 116(14.58,-7.25) 117(14.58,-6.75) 118(14.58,-6.25) 119(14.58,-5.75) 120(14.58,-5.25) 121(14.58,-4.75) 122(14.58,-4.25) 123(14.58,-3.75) 124(14.58,-3.25) 125(14.58,-2.75) 126(14.58,-2.25) 127(14.58,-1.75) 128(14.58,-1.25) 129(14.58,-0.75) 130(14.58,-0.25) 131(14.58,0.25) 132(14.58,0.75) 133(14.58,1.25) 134(14.58,1.75) 135(14.58,2.25) 136(14.58,2.75) 137(14.58,3.25) 138(14.58,3.75) 139(14.58,4.25) 140(14.58,4.75) 141(14.58,5.25) 142(14.58,5.75) 143(14.58,6.25) 144(14.58,6.75) 145(14.58,7.25) 146(14.58,7.75) 147(14.58,8.25) 148(14.58,8.75) 149(14.58,9.25) 150(14.58,9.75) 151(14.58,10.25) 152(14.58,10.75) 153(14.58,11.25) 154(14.58,11.75) 155(14.58,12.25) 156(14.58,12.75)
  rect 0.28x1.67 smd: 53(-12.75,-14.58) 54(-12.25,-14.58) 55(-11.75,-14.58) 56(-11.25,-14.58) 57(-10.75,-14.58) 58(-10.25,-14.58) 59(-9.75,-14.58) 60(-9.25,-14.58) 61(-8.75,-14.58) 62(-8.25,-14.58) 63(-7.75,-14.58) 64(-7.25,-14.58) 65(-6.75,-14.58) 66(-6.25,-14.58) 67(-5.75,-14.58) 68(-5.25,-14.58) 69(-4.75,-14.58) 70(-4.25,-14.58) 71(-3.75,-14.58) 72(-3.25,-14.58) 73(-2.75,-14.58) 74(-2.25,-14.58) 75(-1.75,-14.58) 76(-1.25,-14.58) 77(-0.75,-14.58) 78(-0.25,-14.58) 79(0.25,-14.58) 80(0.75,-14.58) 81(1.25,-14.58) 82(1.75,-14.58) 83(2.25,-14.58) 84(2.75,-14.58) 85(3.25,-14.58) 86(3.75,-14.58) 87(4.25,-14.58) 88(4.75,-14.58) 89(5.25,-14.58) 90(5.75,-14.58) 91(6.25,-14.58) 92(6.75,-14.58) 93(7.25,-14.58) 94(7.75,-14.58) 95(8.25,-14.58) 96(8.75,-14.58) 97(9.25,-14.58) 98(9.75,-14.58) 99(10.25,-14.58) 100(10.75,-14.58) 101(11.25,-14.58) 102(11.75,-14.58) 103(12.25,-14.58) 104(12.75,-14.58) 157(12.75,14.58) 158(12.25,14.58) 159(11.75,14.58) 160(11.25,14.58) 161(10.75,14.58) 162(10.25,14.58) 163(9.75,14.58) 164(9.25,14.58) 165(8.75,14.58) 166(8.25,14.58) 167(7.75,14.58) 168(7.25,14.58) 169(6.75,14.58) 170(6.25,14.58) 171(5.75,14.58) 172(5.25,14.58) 173(4.75,14.58) 174(4.25,14.58) 175(3.75,14.58) 176(3.25,14.58) 177(2.75,14.58) 178(2.25,14.58) 179(1.75,14.58) 180(1.25,14.58) 181(0.75,14.58) 182(0.25,14.58) 183(-0.25,14.58) 184(-0.75,14.58) 185(-1.25,14.58) 186(-1.75,14.58) 187(-2.25,14.58) 188(-2.75,14.58) 189(-3.25,14.58) 190(-3.75,14.58) 191(-4.25,14.58) 192(-4.75,14.58) 193(-5.25,14.58) 194(-5.75,14.58) 195(-6.25,14.58) 196(-6.75,14.58) 197(-7.25,14.58) 198(-7.75,14.58) 199(-8.25,14.58) 200(-8.75,14.58) 201(-9.25,14.58) 202(-9.75,14.58) 203(-10.25,14.58) 204(-10.75,14.58) 205(-11.25,14.58) 206(-11.75,14.58) 207(-12.25,14.58) 208(-12.75,14.58)
Top Overlay:
  circle w0.15: c-13.138,13.138 r0.075
  region: -13.042,14.076 -14.076,13.042 -14.076,14.076
  lines w0.152: -14.076,-13.042 -14.076,-14.076 -13.042,-14.076 ; -14.076,13.042 -14.076,14.076 -13.042,14.076 ; 13.042,-14.076 14.076,-14.076 14.076,-13.042 ; 13.042,14.076 14.076,14.076 14.076,13.042
  lines w0.254: -14.478,13.208 -14.478,14.478 -13.208,14.478
3D body "STM32F779BIT6.STEP": height 1.6, standoff 0, extent -15,-15 15,15

## NRF9161-LACA-R [mm]
pads (159):
  rect 0.3x0.3 smd paste+0 mask+0.05: 1(-1.75,1.8) 2(-1.75,1.3) 3(-1.75,0.8) 4(-1.75,0.3) 5(-1.75,-0.2) 6(-1.75,-0.7) 7(-1.75,-1.2) 8(-1.75,-1.7) 9(-1.75,-2.2) 10(-1.75,-2.7) 11(-1.75,-3.2) 12(-1.75,-3.7) 13(-1.75,-4.2) 14(-1.75,-4.7) 15(-1.75,-5.2) 16(-1.75,-5.7) 17(-1.75,-6.2) 18(-1.75,-6.7) 19(-1.75,-7.2) 20(-1.75,-7.7) 21(-1.75,-8.2) 22(-1.25,-8.2) 23(-0.75,-8.2) 24(-0.25,-8.2) 25(0.25,-8.2) 26(0.75,-8.2) 27(1.25,-8.2) 28(1.75,-8.2) 29(2.25,-8.2) 30(2.75,-8.2) 31(3.25,-8.2) 32(3.75,-8.2) 33(4.25,-8.2) 34(4.75,-8.2) 35(5.25,-8.2) 36(5.75,-8.2) 37(6.25,-8.2) 38(6.75,-8.2) 39(7.25,-8.2) 40(7.75,-8.2) 41(8.25,-8.2) 42(8.75,-8.2) 43(9.25,-8.2) 44(9.75,-8.2) 45(10.25,-8.2) 46(10.75,-8.2) 47(11.25,-8.2) 48(11.75,-8.2) 49(12.25,-8.2) 50(12.75,-8.2) 51(13.25,-8.2) 52(13.75,-8.2) 53(13.75,-7.7) 54(13.75,-7.2) 55(13.75,-6.7) 56(13.75,-6.2) 57(13.75,-5.7) 58(13.75,-5.2) 59(13.75,-4.7) 60(13.75,-4.2) 61(13.75,-3.7) 62(13.75,-3.2) 63(13.75,-2.7) 64(13.75,-2.2) 65(13.75,-1.7) 66(13.75,-1.2) 67(13.75,-0.7) 68(13.75,-0.2) 69(13.75,0.3) 70(13.75,0.8) 71(13.75,1.3) 72(13.75,1.8) 73(13.25,1.8) 74(12.75,1.8) 75(12.25,1.8) 76(11.75,1.8) 77(11.25,1.8) 78(10.75,1.8) 79(10.25,1.8) 80(9.75,1.8) 81(9.25,1.8) 82(8.75,1.8) 83(8.25,1.8) 84(7.75,1.8) 85(7.25,1.8) 86(6.75,1.8) 87(6.25,1.8) 88(5.75,1.8) 89(5.25,1.8) 90(4.75,1.8) 91(4.25,1.8) 92(3.75,1.8) 93(3.25,1.8) 94(2.75,1.8) 95(2.25,1.8) 96(1.75,1.8) 97(1.25,1.8) 98(0.75,1.8) 99(0.25,1.8) 100(-0.25,1.8) 101(-0.75,1.8) 102(-1.25,1.8)
  rect 0.8x0.8 smd mask+0.05: 103(0,-6.4) 103(0,-4.8) 103(0,-3.2) 103(0,-1.6) 103(0,0) 103(2,-6.4) 103(2,-4.8) 103(2,-1.6) 103(2,0) 103(2,-3.2) 103(4,-6.4) 103(4,-4.8) 103(4,-3.2) 103(4,-1.6) 103(4,0) 103(6,-6.4) 103(6,-4.8) 103(6,-3.2) 103(6,-1.6) 103(6,0) 103(8,-6.4) 103(8,-4.8) 103(8,-3.2) 103(8,-1.6) 103(8,0) 103(10,-3.2) 103(10,-6.4) 103(10,0) 103(12,-6.4) 103(12,-3.2) 103(12,0)
  rect 1.6x0.8 smd paste-5 mask+0.05: 103(11,-1.6) 103(11,-4.8)
  rect 0.3x0.3 smd mask+0.05: 104(0.25,-7.55) 105(0.75,-7.55) 106(1.25,-7.55) 107(1.75,-7.55) 108(4.25,-7.55) 109(4.75,-7.55) 110(5.25,-7.55) 111(5.75,-7.55) 112(9.25,-7.55) 113(9.75,-7.55) 114(10.25,-7.55) 115(10.75,-7.55) 116(10.75,1.15) 117(10.25,1.15) 118(9.75,1.15) 119(9.25,1.15) 120(5.75,1.15) 121(5.25,1.15) 122(4.75,1.15) 123(4.25,1.15) 124(1.75,1.15) 125(1.25,1.15) 126(0.75,1.15) 127(0.25,1.15)
Top Overlay:
  rectangle: -2.148,1.93 -1.93,2.198
  lines w0.127: -2.438,1.702 -2.438,1.956 -2.311,1.829 -2.438,1.702
  lines w0.15: -2.148,-8.599 14.148,-8.599 14.148,2.197 14.146,2.198 -2.148,2.198 -2.148,-8.611 14.148,-8.611
Top Paste:
  rectangle: 10.2,-5.2 11.8,-4.4
  rectangle: 10.2,-2 11.8,-1.2
3D body "nRF9161.step": height 1.2, standoff 0, extent -2.05,-8.5 14.05,2.1

## QFN-36-EP(5x6) [mm]
pads (37):
  rect 0.8x0.3 smd: 1(-2.45,2.25) 2(-2.45,1.75) 3(-2.45,1.25) 4(-2.45,0.75) 5(-2.45,0.25) 6(-2.45,-0.25) 7(-2.45,-0.75) 8(-2.45,-1.25) 9(-2.45,-1.75) 10(-2.45,-2.25) 19(2.45,-2.25) 20(2.45,-1.75) 21(2.45,-1.25) 22(2.45,-0.75) 23(2.45,-0.25) 24(2.45,0.25) 25(2.45,0.75) 26(2.45,1.25) 27(2.45,1.75) 28(2.45,2.25)
  rect 0.3x0.8 smd: 11(-1.75,-2.95) 12(-1.25,-2.95) 13(-0.75,-2.95) 14(-0.25,-2.95) 15(0.25,-2.95) 16(0.75,-2.95) 17(1.25,-2.95) 18(1.75,-2.95) 29(1.75,2.95) 30(1.25,2.95) 31(0.75,2.95) 32(0.25,2.95) 33(-0.25,2.95) 34(-0.75,2.95) 35(-1.25,2.95) 36(-1.75,2.95)
  rect 3.6x4.1 smd: 37(0,0)
Top Overlay:
  lines w0.127: -2.603,-2.642 -2.603,-3.099 -2.057,-3.099 ; -2.603,2.642 -2.603,3.099 -2.057,3.099 ; 2.057,-3.099 2.604,-3.099 2.604,-2.642 ; 2.057,3.099 2.604,3.099 2.604,2.642 ; -3.175,2.159 -3.048,2.286 -3.175,2.413 -3.175,2.159
3D body "QFN36_5X6_TRI.step": height 0.84, standoff 0, extent -2.553,-3.048 2.553,3.048

## QFN-64-EP(9x9) [mm]
pads (65):
  rect 0.7x0.25 smd: 1(-4.4,3.75) 2(-4.4,3.25) 3(-4.4,2.75) 4(-4.4,2.25) 5(-4.4,1.75) 6(-4.4,1.25) 7(-4.4,0.75) 8(-4.4,0.25) 9(-4.4,-0.25) 10(-4.4,-0.75) 11(-4.4,-1.25) 12(-4.4,-1.75) 13(-4.4,-2.25) 14(-4.4,-2.75) 15(-4.4,-3.25) 16(-4.4,-3.75) 33(4.4,-3.75) 34(4.4,-3.25) 35(4.4,-2.75) 36(4.4,-2.25) 37(4.4,-1.75) 38(4.4,-1.25) 39(4.4,-0.75) 40(4.4,-0.25) 41(4.4,0.25) 42(4.4,0.75) 43(4.4,1.25) 44(4.4,1.75) 45(4.4,2.25) 46(4.4,2.75) 47(4.4,3.25) 48(4.4,3.75)
  rect 0.25x0.7 smd: 17(-3.75,-4.4) 18(-3.25,-4.4) 19(-2.75,-4.4) 20(-2.25,-4.4) 21(-1.75,-4.4) 22(-1.25,-4.4) 23(-0.75,-4.4) 24(-0.25,-4.4) 25(0.25,-4.4) 26(0.75,-4.4) 27(1.25,-4.4) 28(1.75,-4.4) 29(2.25,-4.4) 30(2.75,-4.4) 31(3.25,-4.4) 32(3.75,-4.4) 49(3.75,4.4) 50(3.25,4.4) 51(2.75,4.4) 52(2.25,4.4) 53(1.75,4.4) 54(1.25,4.4) 55(0.75,4.4) 56(0.25,4.4) 57(-0.25,4.4) 58(-0.75,4.4) 59(-1.25,4.4) 60(-1.75,4.4) 61(-2.25,4.4) 62(-2.75,4.4) 63(-3.25,4.4) 64(-3.75,4.4)
  rect 7.15x7.15 smd: 65(0,0)
Top Overlay:
  lines w0.127: -4.465,-4.039 -4.465,-4.5 -4.004,-4.5 ; -4.465,4.039 -4.465,4.5 -4.004,4.5 ; 4.074,-4.5 4.535,-4.5 4.535,-4.039 ; 4.074,4.5 4.535,4.5 4.535,4.039 ; -4.953,3.708 -4.953,3.81 -4.902,3.759 -4.953,3.708
3D body "User Library-QFN64-2.step": height 0.9, standoff 0, extent -4.52,-4.52 4.52,4.52

## QFNWB-56 (7×7) [mm]
pads (57):
  rect 0.65x0.22 smd: 1(-3.425,2.6) 2(-3.425,2.2) 3(-3.425,1.8) 4(-3.425,1.4) 5(-3.425,1) 6(-3.425,0.6) 7(-3.425,0.2) 8(-3.425,-0.2) 9(-3.425,-0.6) 10(-3.425,-1) 11(-3.425,-1.4) 12(-3.425,-1.8) 13(-3.425,-2.2) 14(-3.425,-2.6) 29(3.425,-2.6) 30(3.425,-2.2) 31(3.425,-1.8) 32(3.425,-1.4) 33(3.425,-1) 34(3.425,-0.6) 35(3.425,-0.2) 36(3.425,0.2) 37(3.425,0.6) 38(3.425,1) 39(3.425,1.4) 40(3.425,1.8) 41(3.425,2.2) 42(3.425,2.6)
  rect 0.22x0.65 smd: 15(-2.6,-3.425) 16(-2.2,-3.425) 17(-1.8,-3.425) 18(-1.4,-3.425) 19(-1,-3.425) 20(-0.6,-3.425) 21(-0.2,-3.425) 22(0.2,-3.425) 23(0.6,-3.425) 24(1,-3.425) 25(1.4,-3.425) 26(1.8,-3.425) 27(2.2,-3.425) 28(2.6,-3.425) 43(2.6,3.425) 44(2.2,3.425) 45(1.8,3.425) 46(1.4,3.425) 47(1,3.425) 48(0.6,3.425) 49(0.2,3.425) 50(-0.2,3.425) 51(-0.6,3.425) 52(-1,3.425) 53(-1.4,3.425) 54(-1.8,3.425) 55(-2.2,3.425) 56(-2.6,3.425)
  rect 5.7x5.7 smd: 57(0,0)
Top Overlay:
  lines w0.127: -3.556,-2.946 -3.556,-3.556 -2.921,-3.556 ; -3.556,2.946 -3.556,3.556 -2.921,3.556 ; 2.921,-3.556 3.556,-3.556 3.556,-2.946 ; 2.921,3.556 3.556,3.556 3.556,2.946 ; -4.039,2.464 -3.912,2.591 -4.039,2.718 -4.039,2.464
3D body "ESP32-S3R8.STEP": height 0.92, standoff -0.03, extent -3.5,-3.507 3.5,3.493

## SOIC-8(0.154", 3.90mm Width) [mm]
pads (8):
  rect 1.55x0.6 smd: 1(-2.7,1.905) 2(-2.7,0.635) 3(-2.7,-0.635) 4(-2.7,-1.905) 5(2.7,-1.905) 6(2.7,-0.635) 7(2.7,0.635) 8(2.7,1.905)
Top Overlay:
  rectangle: -1.838,1.626 -1.483,2.21
  lines w0.127: -1.829,-2.515 1.803,-2.515 ; -1.829,2.515 1.803,2.515 ; -3.794,1.803 -3.667,1.93 -3.794,2.057 -3.794,1.803
3D body "D0008A.stp": height 1.63, standoff 0, extent -3.011,-2.451 3.011,2.451

## SOP-28-300mil [mm]
pads (28):
  rect 2x0.6 smd: 1(-4.7,8.255) 2(-4.7,6.985) 3(-4.7,5.715) 4(-4.7,4.445) 5(-4.7,3.175) 6(-4.7,1.905) 7(-4.7,0.635) 8(-4.7,-0.635) 9(-4.7,-1.905) 10(-4.7,-3.175) 11(-4.7,-4.445) 12(-4.7,-5.715) 13(-4.7,-6.985) 14(-4.7,-8.255) 15(4.7,-8.255) 16(4.7,-6.985) 17(4.7,-5.715) 18(4.7,-4.445) 19(4.7,-3.175) 20(4.7,-1.905) 21(4.7,-0.635) 22(4.7,0.635) 23(4.7,1.905) 24(4.7,3.175) 25(4.7,4.445) 26(4.7,5.715) 27(4.7,6.985) 28(4.7,8.255)
Top Overlay:
  lines w0.127: -3.556,-9.017 3.556,-9.017 ; -3.556,9.017 3.556,9.017
  lines w0.2: -6.024,8.145 -5.897,8.272 -6.024,8.399 -6.024,8.145
3D body "PIC16F886-I_SO.STEP": height 2.65, standoff 0, extent -5.15,-8.95 5.15,8.95